# EAGLE library part MCP4725-DAC-MODULE (library moto-edge-hil)
MCP4725-DAC-MODULE MCP4725 12-bit I2C DAC (programlanabilir besleme referansi). Kart: 18.0 x 21.0 mm - Guven: M STEP: GrabCAD 'MCP4725 module'
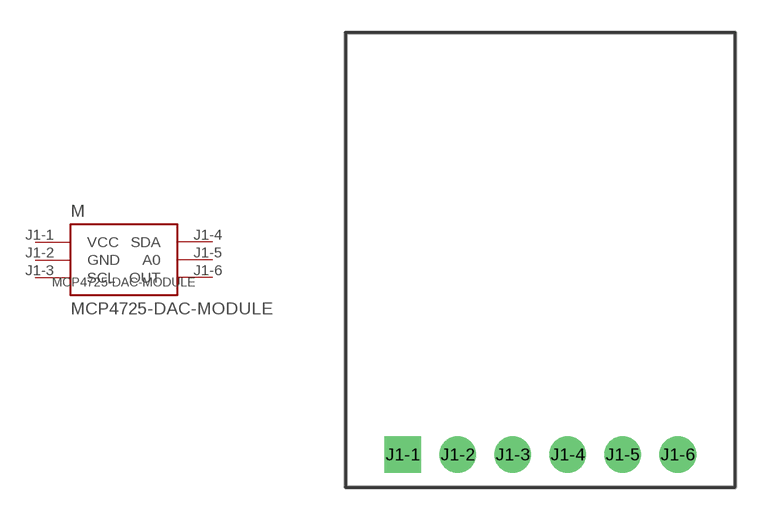
[diagram p5: symbol with the pads of MCP4725-DAC-MODULE; footprint MCP4725-DAC-MODULE]

Designator prefix M

## MCP4725-DAC-MODULE (BOARD_SIZE: 18.0x21.0mm; CONFIDENCE: M)  [MCP4725-DAC-MODULE]
J1-1  VCC  pas
J1-2  GND  pas
J1-3  SCL  pas
J1-4  SDA  pas
J1-5  A0  pas
J1-6  OUT  pas

## Footprint MCP4725-DAC-MODULE (pad centres in mm)
MCP4725 12-bit I2C DAC (programlanabilir besleme referansi). | Kart: 18.0 x 21.0 mm | Guven: M
drill 1 pad 1.7 square: J1-1 -6.35,-9
drill 1 pad 1.7 round: J1-2 -3.81,-9; J1-3 -1.27,-9; J1-4 1.27,-9; J1-5 3.81,-9; J1-6 6.35,-9